# Altium footprint library EasyLib.PcbLib: 65 footprints (part 2 of 5)
Each footprint in its own frame and in the unit in brackets; x right, y up, seen from the top. Pads: shape width x height; smd on the part's side, far side on the other; paste and mask are expansions set on the pad; w line width, h text height; cw(c..) or ccw(c..) is an arc to the next point about the centre after c.
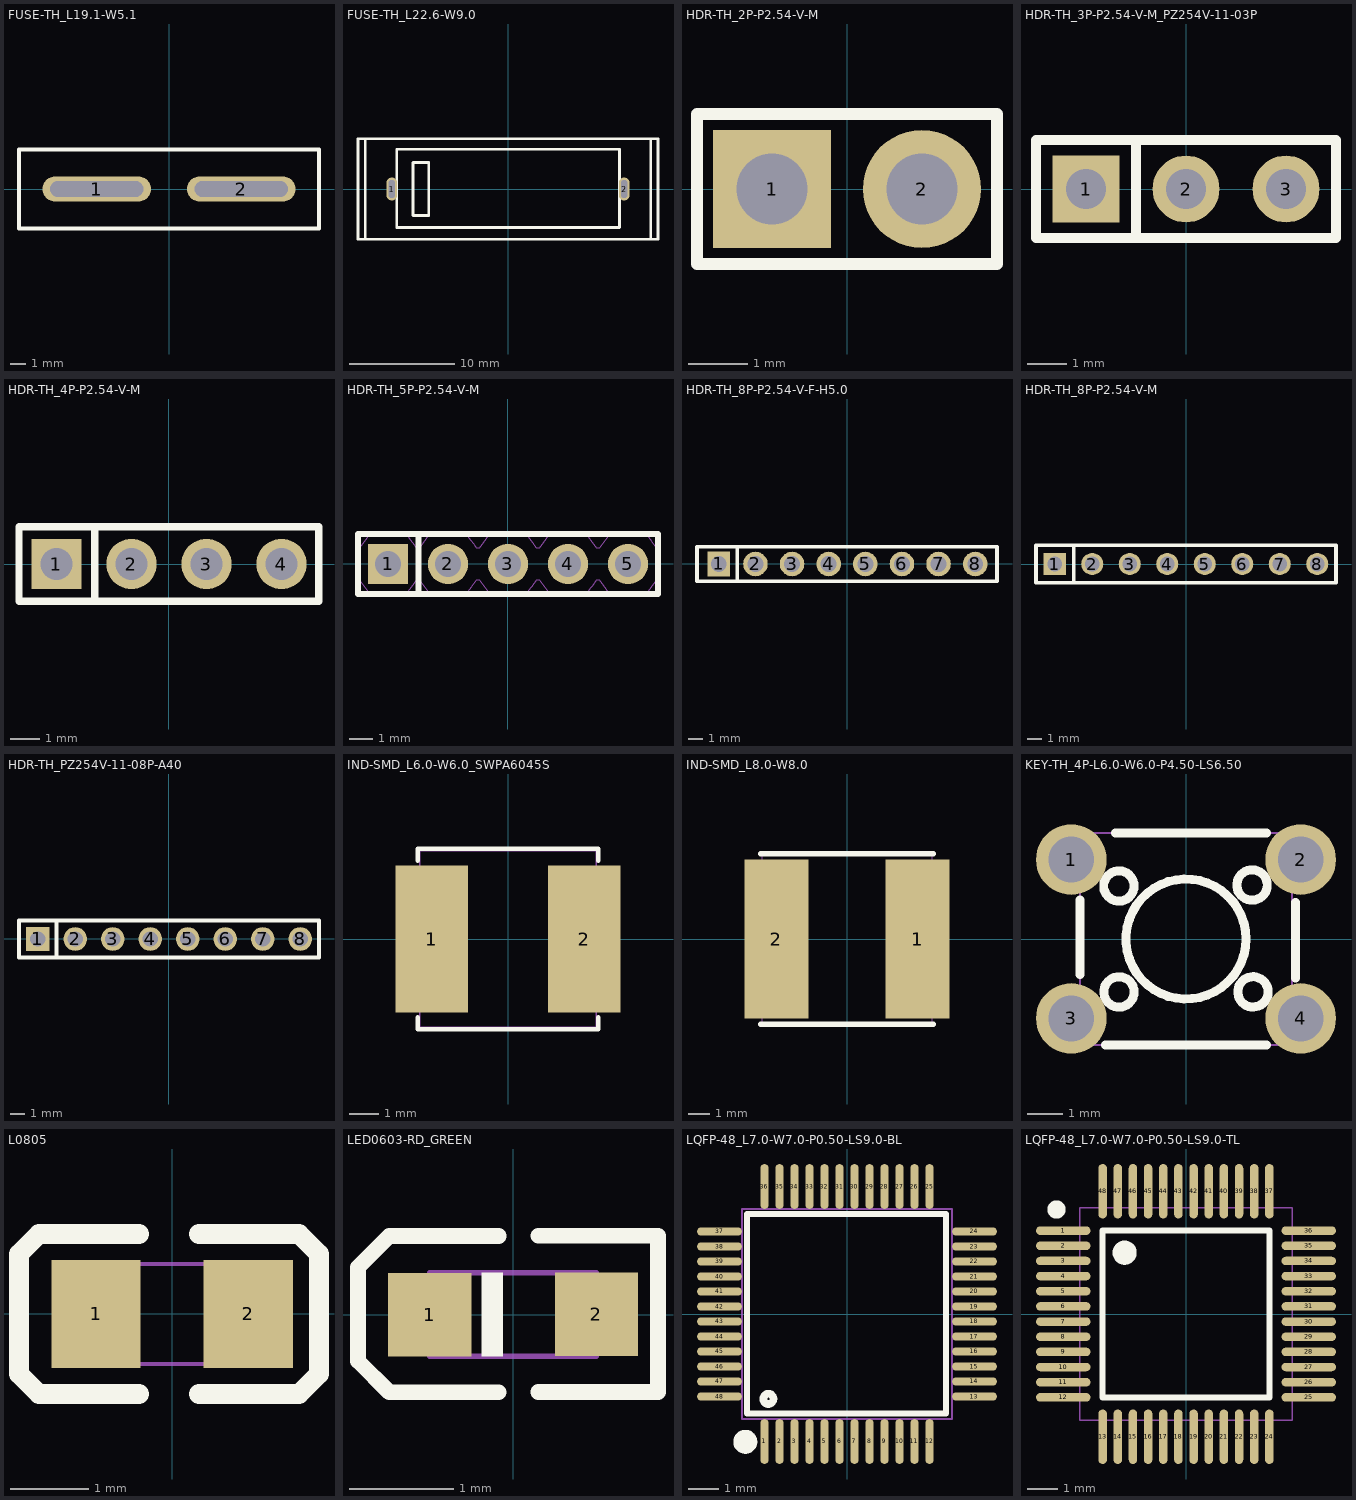
[diagram p1: the footprints below, top view; thin cyan lines are the x and y axes]

## FUSE-TH_L19.1-W5.1 [mm]
height 11.8
pads (2):
  oval 7x1.6 hole 1 slot 6 at 0 deg: 1(-4.65,0) 2(4.65,0)
Top Overlay:
  lines w0.254: -9.652,-2.54 9.652,-2.54 9.652,2.54 -9.652,2.54 -9.652,-2.54
Mechanical 15:
  lines w0.051: -9.55,-2.55 -9.55,2.55 9.55,2.55 9.55,-2.55 -9.55,-2.55
3D body "FUSE-TH_L19.1-W5.1.step": height 11.8, standoff 0, extent -9.55,-2.55 9.55,2.55

## FUSE-TH_L22.6-W9.0 [mm] "5x20 BLX-"
height 10.5
pads (2):
  oval 1x2.2 hole 0.6 slot 1.7 at 90 deg: 1(-11,0) 2(11,0)
Top Overlay:
  lines w0.254: -13.5,-4.75 -14.2,-4.75 -14.2,4.75 -13.5,4.75 ; -13.5,-4.75 -13.5,4.75 ; -13.5,-4.75 13.5,-4.75 ; -13.5,4.75 13.5,4.75 ; 13.5,-4.75 14.2,-4.75 14.2,4.75 13.5,4.75 ; 13.5,-4.75 13.5,4.75 ; -10.543,-3.649 10.557,-3.649 10.557,3.751 -10.543,3.751 -10.543,-3.649 ; -9,-2.5 -7.5,-2.5 -7.5,2.5 -9,2.5 -9,-2.5
Mechanical 15:
  lines w0.051: -14.2,-4.75 -14.2,4.75 14.2,4.75 14.2,-4.75 -14.2,-4.75
3D body "FUSE-TH_L22.6-W9.0.step": height 10.5, standoff 0, extent -13.6,-4.751 13.4,4.75

## HDR-TH_2P-P2.54-V-M [mm]
height 8.5
pads (2):
  rect 2x2 hole 1.2: 1(-1.27,0)
  round 2 hole 1.2: 2(1.27,0)
Top Overlay:
  lines w0.203: -2.54,-1.27 2.54,-1.27 2.54,1.27 -0.635,1.27 -2.54,1.27 -2.54,-1.27
Mechanical 15:
  lines w0.051: -2.54,-1.25 -2.54,1.25 2.54,1.25 2.54,-1.25 -2.54,-1.25
3D body "HDR2.54-M-LI-1X2P.step": height 8.5, standoff 0, extent -2.545,-1.27 2.545,1.27

## HDR-TH_3P-P2.54-V-M_PZ254V-11-03P [mm]
height 8.5
pads (3):
  rect 1.7x1.7 hole 1.02: 1(-2.54,0)
  round 1.7 hole 1.02: 2(0,0) 3(2.54,0)
Top Overlay:
  lines w0.254: -1.27,-1.25 -1.27,1.25 ; 3.809,-1.25 3.809,1.25 -3.81,1.25 -3.81,-1.25 3.81,-1.25
Mechanical 15:
  lines w0.051: -3.81,-1.25 -3.81,1.25 3.81,1.25 3.81,-1.25 -3.81,-1.25
3D body "HDR-TH_3P-P2.54-V-M_PZ254V-11-03P.step": height 8.5, standoff 0, extent -3.815,-1.27 3.815,1.27

## HDR-TH_4P-P2.54-V-M [mm]
height 8.54
pads (4):
  rect 1.7x1.7 hole 1.1: 1(-3.81,0)
  round 1.7 hole 1.1: 2(-1.27,0) 3(1.27,0) 4(3.81,0)
Top Overlay:
  lines w0.254: -2.516,-1.27 -2.516,1.27 ; -2.516,1.27 5.08,1.27 5.08,-1.27 -5.08,-1.27 -5.08,1.27 -2.516,1.27
Mechanical 15:
  lines w0.051: -5.08,-1.25 -5.08,1.25 5.08,1.25 5.08,-1.25 -5.08,-1.25
3D body "HDR-TH_4P-P2.54-M-LI-1X4P.step": height 8.54, standoff 0, extent -5.085,-1.33 5.085,1.33

## HDR-TH_5P-P2.54-V-M [mm]
height 8.54
pads (5):
  rect 1.7x1.7 hole 1.1: 1(-5.08,0)
  round 1.7 hole 1.1: 2(-2.54,0) 3(0,0) 4(2.54,0) 5(5.08,0)
Top Overlay:
  lines w0.254: -3.786,-1.27 -3.786,1.27 ; -6.35,-1.27 6.35,-1.27 6.35,1.27 -6.35,1.27 -6.35,-1.27
Mechanical 15:
  lines w0.051: -6.35,-0.67 -6.35,0.67 -6.299,0.67 -6.028,1.032 -5.85,1.27 -4.31,1.27 -4.149,1.059 -4.048,0.925 -4.017,0.884 -3.86,0.67 -3.76,0.67 -3.31,1.27 -1.77,1.27 -1.631,1.088 -1.546,0.976 -1.459,0.859 -1.436,0.827 -1.417,0.801 -1.32,0.67 -1.22,0.67 -0.77,1.27 0.77,1.27 0.867,1.143 1.01,0.955 1.108,0.822 1.136,0.783 1.22,0.67 1.32,0.67 1.77,1.27 3.31,1.27 3.458,1.076 3.533,0.979 3.76,0.67 3.86,0.67 4.311,1.27 5.85,1.27 6.079,0.97 6.112,0.925 6.3,0.67 6.35,0.67 6.35,-0.67 6.3,-0.67 6.075,-0.976 5.85,-1.27 4.31,-1.27 3.86,-0.67 3.759,-0.67 3.581,-0.913 3.545,-0.963 3.51,-1.009 3.31,-1.271 1.77,-1.27 1.32,-0.67 1.22,-0.67 1.02,-0.942 0.992,-0.98 0.77,-1.27 -0.77,-1.27 -1.22,-0.67 -1.32,-0.67 -1.503,-0.919 -1.542,-0.972 -1.77,-1.27 -3.31,-1.27 -3.76,-0.67 -3.86,-0.67 -4.077,-0.965 -4.31,-1.27 -5.85,-1.27 -6.3,-0.67 -6.35,-0.67 -6.35,-0.67 ; -6.35,-0.67 -6.35,-0.67
3D body "HDR-TH_5P-P2.54-M-LI-1X5P.step": height 8.54, standoff 0, extent -6.355,-1.27 6.355,1.27

## HDR-TH_8P-P2.54-V-F-H5.0 [mm]
height 5
pads (8):
  rect 1.575x1.7 hole 1.1: 1(-8.89,0)
  round 1.7 hole 1.1: 2(-6.35,0) 3(-3.81,0) 4(-1.27,0) 5(1.27,0) 6(3.81,0) 7(6.35,0) 8(8.89,0)
Top Overlay:
  lines w0.254: -7.62,-1.143 -7.62,1.143 ; -10.4,-1.2 10.4,-1.2 10.4,1.2 -10.4,1.2 -10.4,-1.2
Mechanical 15:
  lines w0.051: -10.36,-1.2 10.36,-1.2 10.36,1.2 -10.36,1.2 -10.36,-1.2
3D body "HDR-TH_8P-P2.54-V-F-H5.0.step": height 5, standoff 0, extent -10.411,-1.25 10.41,1.25

## HDR-TH_8P-P2.54-V-M [mm]
height 8.5
pads (8):
  rect 1.5x1.5 hole 1: 1(-8.89,0)
  round 1.5 hole 1: 2(-6.35,0) 3(-3.81,0) 4(-1.27,0) 5(1.27,0) 6(3.81,0) 7(6.35,0) 8(8.89,0)
Top Overlay:
  lines w0.254: -7.596,-1.27 -7.596,1.27 ; -10.16,-1.27 10.16,-1.27 10.16,1.27 -10.16,1.27 -10.16,-1.27
Mechanical 15:
  lines w0.051: -10.16,-1.25 -10.16,1.25 10.16,1.25 10.16,-1.25 -10.16,-1.25
3D body "HDR-TH_8P-P2.54-V-M.step": height 8.5, standoff 0, extent -10.265,-1.25 10.265,1.25

## HDR-TH_PZ254V-11-08P-A40 [mm]
height 6.5
pads (8):
  rect 1.6x1.6 hole 1.02: 1(-8.89,0)
  round 1.6 hole 1.02: 2(-6.35,0) 3(-3.81,0) 4(-1.27,0) 5(1.27,0) 6(3.81,0) 7(6.35,0) 8(8.89,0)
Top Overlay:
  lines w0.254: -7.62,-1.25 -7.62,1.25 ; -10.16,-1.25 -10.16,1.25 10.16,1.25 10.16,-1.25 -10.16,-1.25
Mechanical 15:
  lines w0.051: -10.16,-1.25 10.16,-1.25 10.16,1.25 -10.16,1.25 -10.16,-1.25
3D body "HDR-TH_PZ254V-11-08P-A40.step": height 6.5, standoff 0, extent -10.165,-1.25 10.165,1.25

## IND-SMD_L6.0-W6.0_SWPA6045S [mm] "10uH ±20%"
height 4.52
pads (2):
  rect 2.474x5.02 smd: 1(-2.603,0) 2(2.603,0)
Top Overlay:
  lines w0.152: -3.076,-2.662 -3.076,-3.076 3.076,-3.076 3.076,-2.662 ; -3.076,2.662 -3.076,3.076 3.076,3.076 3.076,2.662
Mechanical 15:
  lines w0.051: -3,-3 -3,3 3,3 3,-3 -3,-3
3D body "IND-SMD_L6.0-W6.0-H4.5.step": height 4.52, standoff 0, extent -3.01,-3 3.01,3

## IND-SMD_L8.0-W8.0 [mm] "22uH ±20%"
height 4.21
pads (2):
  rect 3.024x7.5 smd: 1(3.328,0) 2(-3.328,0)
Top Overlay:
  lines w0.254: -4.076,-4.018 4.076,-4.018 ; -4.076,4.018 4.076,4.018
Mechanical 15:
  lines w0.051: -4,-4 -4,4 4,4 4,-4 -4,-4
3D body "IND-SMD_L8.0-W8.0-H4.2.step": height 4.21, standoff 0, extent -4,-4 4,4

## KEY-TH_4P-L6.0-W6.0-P4.50-LS6.50 [mm]
height 6
pads (4):
  round 2 hole 1.3: 1(-3.25,2.25) 2(3.25,2.25) 3(-3.25,-2.25) 4(3.25,-2.25)
Top Overlay:
  circle w0.254: c0,0 r1.7
  circle w0.254: c1.898,-1.498 r0.43
  circle w0.254: c-1.902,1.502 r0.43
  circle w0.254: c-1.9,-1.5 r0.43
  circle w0.254: c1.872,1.529 r0.43
  lines w0.254: -3,-1 -3,1.1 ; -2.274,-3 2.274,-3 ; -2,3 2.274,3 ; 3.1,-1.1 3.1,1.028
Mechanical 15:
  lines w0.051: -3,-3 -3,3 3,3 3,-3 -3,-3
3D body "KEY-TH_4P-L6.0-W6.0-P4.50-LS6.50.step": height 6, standoff 0, extent -3.877,-3 3.877,3

## L0805 [mm] "220Ohm ±25% @100MHz 2A"
height 0.61
pads (2):
  rect 1.133x1.377 smd: 1(-0.966,0) 2(0.966,0)
Top Overlay:
  lines w0.254: -0.421,-1.016 -1.691,-1.016 -1.945,-0.762 -1.945,-0.635 -1.945,0.762 -1.691,1.016 -1.564,1.016 -0.421,1.016 ; 0.341,-1.016 1.484,-1.016 1.611,-1.016 1.865,-0.762 1.865,0.635 1.865,0.762 1.611,1.016 0.341,1.016
Mechanical 15:
  lines w0.051: -1,-0.637 -1,0.638 1,0.638 1,-0.637 -1,-0.637
3D body "R0805_L2.0-W1.3-H0.6.step": height 0.61, standoff 0, extent -1,-0.65 1,0.651

## LED0603-RD_GREEN [mm]
height 0.6
pads (2):
  rect 0.8x0.8 smd: 1(-0.799,-0.003) 2(0.799,0.003)
Top Overlay:
  region: -0.3,0.4 -0.3,-0.4 -0.1,-0.4 -0.1,0.4
  lines w0.15: -0.14,-0.746 -1.19,-0.746 -1.49,-0.446 -1.49,-0.346 -1.49,0.354 -1.49,0.454 -1.19,0.754 -0.14,0.754 ; 0.24,-0.744 1.39,-0.744 ; 0.24,0.757 1.39,0.757 1.39,-0.723
Mechanical 15:
  lines w0.051: -0.8,-0.4 -0.8,0.4 0.8,0.4 0.8,-0.4 -0.8,-0.4
3D body "LED0603-RD_GREEN.step": height 0.6, standoff 0, extent -0.81,-0.405 0.81,0.405

## LQFP-48_L7.0-W7.0-P0.50-LS9.0-BL [mm] "ARM Cortex-M3 32-bit MCU, 64 KB Flash, 20 KB Internal RAM, 37 IOs, 48-pin LQFP, -40 to 85 degC, Tray"
height 1.45
pads (48):
  oval 0.27x1.5 smd: 1(-2.75,-4.25) 2(-2.25,-4.25) 3(-1.75,-4.25) 4(-1.25,-4.25) 5(-0.75,-4.25) 6(-0.25,-4.25) 7(0.25,-4.25) 8(0.75,-4.25) 9(1.25,-4.25) 10(1.75,-4.25) 11(2.25,-4.25) 12(2.75,-4.25) 25(2.75,4.25) 26(2.25,4.25) 27(1.75,4.25) 28(1.25,4.25) 29(0.75,4.25) 30(0.25,4.25) 31(-0.25,4.25) 32(-0.75,4.25) 33(-1.25,4.25) 34(-1.75,4.25) 35(-2.25,4.25) 36(-2.75,4.25)
  oval 1.5x0.27 smd: 13(4.25,-2.75) 14(4.25,-2.25) 15(4.25,-1.75) 16(4.25,-1.25) 17(4.25,-0.75) 18(4.25,-0.25) 19(4.25,0.25) 20(4.25,0.75) 21(4.25,1.25) 22(4.25,1.75) 23(4.25,2.25) 24(4.25,2.75) 37(-4.25,2.75) 38(-4.25,2.25) 39(-4.25,1.75) 40(-4.25,1.25) 41(-4.25,0.75) 42(-4.25,0.25) 43(-4.25,-0.25) 44(-4.25,-0.75) 45(-4.25,-1.25) 46(-4.25,-1.75) 47(-4.25,-2.25) 48(-4.25,-2.75)
Top Overlay:
  circle w0.254: c-2.62,-2.83 r0.17
  lines w0.2: -2.896,3.34 3.302,3.34 3.302,-3.315 -3.327,-3.315 -3.327,3.34 -2.565,3.34
  lines w0.4: -3.39,-4.06 ccw(c-3.389,-4.26) -3.387,-4.06
Mechanical 15:
  lines w0.051: -3.5,-3.5 3.5,-3.5 3.5,3.5 -3.5,3.5 -3.5,-3.5
3D body "LQFP-48_L7.0-W7.0-H1.4-LS9.0-P0.50.step": height 1.45, standoff 0, extent -4.503,-4.503 4.503,4.503

## LQFP-48_L7.0-W7.0-P0.50-LS9.0-TL [mm]
height 1.45
pads (48):
  oval 1.8x0.28 smd: 1(-4.05,2.75) 2(-4.05,2.25) 3(-4.05,1.75) 4(-4.05,1.25) 5(-4.05,0.75) 6(-4.05,0.25) 7(-4.05,-0.25) 8(-4.05,-0.75) 9(-4.05,-1.25) 10(-4.05,-1.75) 11(-4.05,-2.25) 12(-4.05,-2.75) 25(4.05,-2.75) 26(4.05,-2.25) 27(4.05,-1.75) 28(4.05,-1.25) 29(4.05,-0.75) 30(4.05,-0.25) 31(4.05,0.25) 32(4.05,0.75) 33(4.05,1.25) 34(4.05,1.75) 35(4.05,2.25) 36(4.05,2.75)
  oval 0.28x1.8 smd: 13(-2.75,-4.05) 14(-2.25,-4.05) 15(-1.75,-4.05) 16(-1.25,-4.05) 17(-0.75,-4.05) 18(-0.25,-4.05) 19(0.25,-4.05) 20(0.75,-4.05) 21(1.25,-4.05) 22(1.75,-4.05) 23(2.25,-4.05) 24(2.75,-4.05) 37(2.75,4.05) 38(2.25,4.05) 39(1.75,4.05) 40(1.25,4.05) 41(0.75,4.05) 42(0.25,4.05) 43(-0.25,4.05) 44(-0.75,4.05) 45(-1.25,4.05) 46(-1.75,4.05) 47(-2.25,4.05) 48(-2.75,4.05)
Top Overlay:
  lines w0.2: -2.75,-2.75 2.75,-2.75 2.75,2.75 -2.75,2.75 -2.75,-2.75
  lines w0.3: -4.125,3.447 cw(c-4.275,3.448) -4.125,3.449
  lines w0.4: -1.826,2.022 cw(c-2.026,2.023) -1.826,2.024
Mechanical 15:
  lines w0.051: -3.5,-3.5 -3.5,3.5 3.5,3.5 3.5,-3.5 -3.5,-3.5
3D body "LQFP-48_L7.0-W7.0-H1.4-LS9.0-P0.50.step": height 1.45, standoff 0, extent -4.503,-4.503 4.503,4.503